# Altium footprint library Inductor Footprints.PcbLib: 6 footprints
Each footprint in its own frame and in the unit in brackets; x right, y up, seen from the top. Pads: shape width x height; smd on the part's side, far side on the other; paste and mask are expansions set on the pad; w line width, h text height; cw(c..) or ccw(c..) is an arc to the next point about the centre after c.
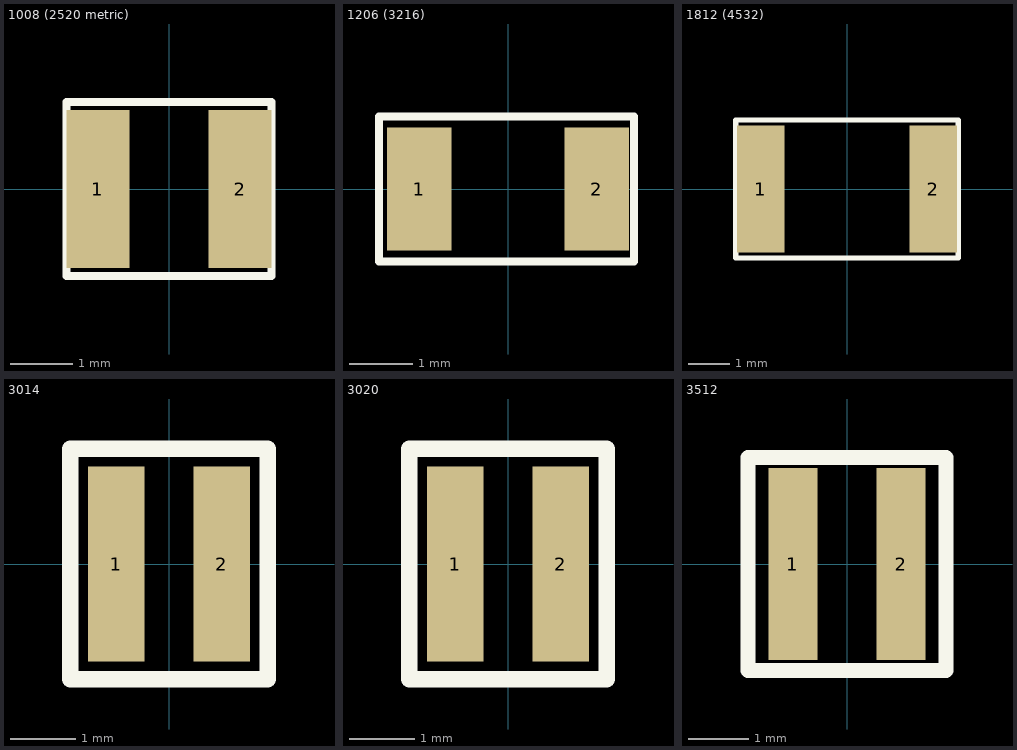
[diagram p0: the footprints below, top view; thin cyan lines are the x and y axes]

## 1008 (2520 metric) [mil]
pads (2):
  rect 40x100 smd: 1(-45,0) 2(45,0)
Top Overlay:
  lines w5: -65,-55 65,-55 65,55 -65,55 -65,-55

## 1206 (3216) [mil]
pads (2):
  rect 40x76 smd: 1(-55,0) 2(55,0)
Top Overlay:
  lines w5: -80,-45 78,-45 78,45 -80,45 -80,-45

## 1812 (4532) [mil]
pads (2):
  rect 45x120 smd: 1(-81.5,0) 2(81.5,0)
Top Overlay:
  lines w5: -105,-65 105,-65 105,65 -105,65 -105,-65

## 3014 [mil]
pads (2):
  rect 34x118 smd: 1(-32,0) 2(32,0)
Top Overlay:
  lines w10: -60,-70 -60,0 -60,70 60,70 60,-70 -60,-70

## 3020 [mil]
pads (2):
  rect 34x118 smd: 1(-32,0) 2(32,0)
Top Overlay:
  lines w10: -60,-70 60,-70 60,70 -60,70 -60,0 -60,-70

## 3512 [mil]
pads (2):
  rect 32x126 smd: 1(-35.5,0) 2(35.5,0)
Top Overlay:
  lines w10: -65,-70 -65,-23.5 -65,70 65,70 65,-70 -65,-70